# Altium schematic symbol library Propia.SchLib: 5 symbols
Pins are listed as number, name and electrical type; pins without a type are passive.

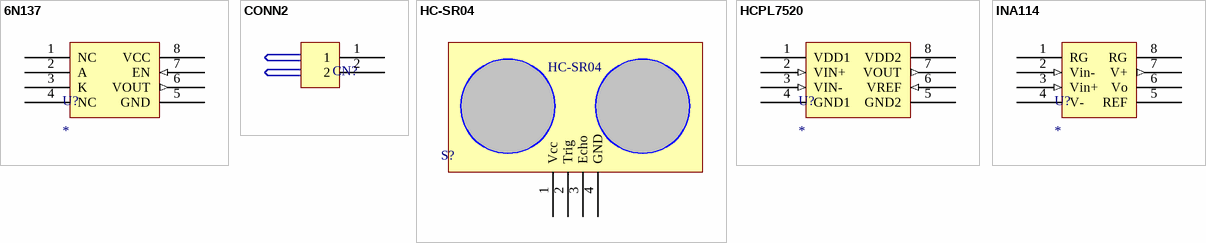
[diagram p0: symbols 6N137 to INA114]

## 6N137
designator U?
footprint DIP-8
pins: 1 NC, 2 A, 3 K, 4 NC, 5 GND (power), 6 VOUT (out), 7 EN (in), 8 VCC (power)

## CONN2
designator CN?
pins: 1, 2

## HC-SR04
designator S?
Sensor de Profundidad
footprint HC-SR04
pins: 1 Vcc, 2 Trig, 3 Echo, 4 GND

## HCPL7520
designator U?
pins: 1 VDD1 (power), 2 VIN+ (in), 3 VIN- (in), 4 GND1 (power), 5 GND2 (power), 6 VREF (in), 7 VOUT (out), 8 VDD2 (power)

## INA114
designator U?
AO de Instrumentacion
footprint DIP-8
pins: 1 RG, 2 Vin- (in), 3 Vin+ (in), 4 V- (power), 5 REF, 6 Vo, 7 V+ (out), 8 RG (power)